# Altium footprint library Biblioteka.PcbLib: 55 footprints (part 2 of 4)
Each footprint in its own frame and in the unit in brackets; x right, y up, seen from the top. Pads: shape width x height; smd on the part's side, far side on the other; paste and mask are expansions set on the pad; w line width, h text height; cw(c..) or ccw(c..) is an arc to the next point about the centre after c.
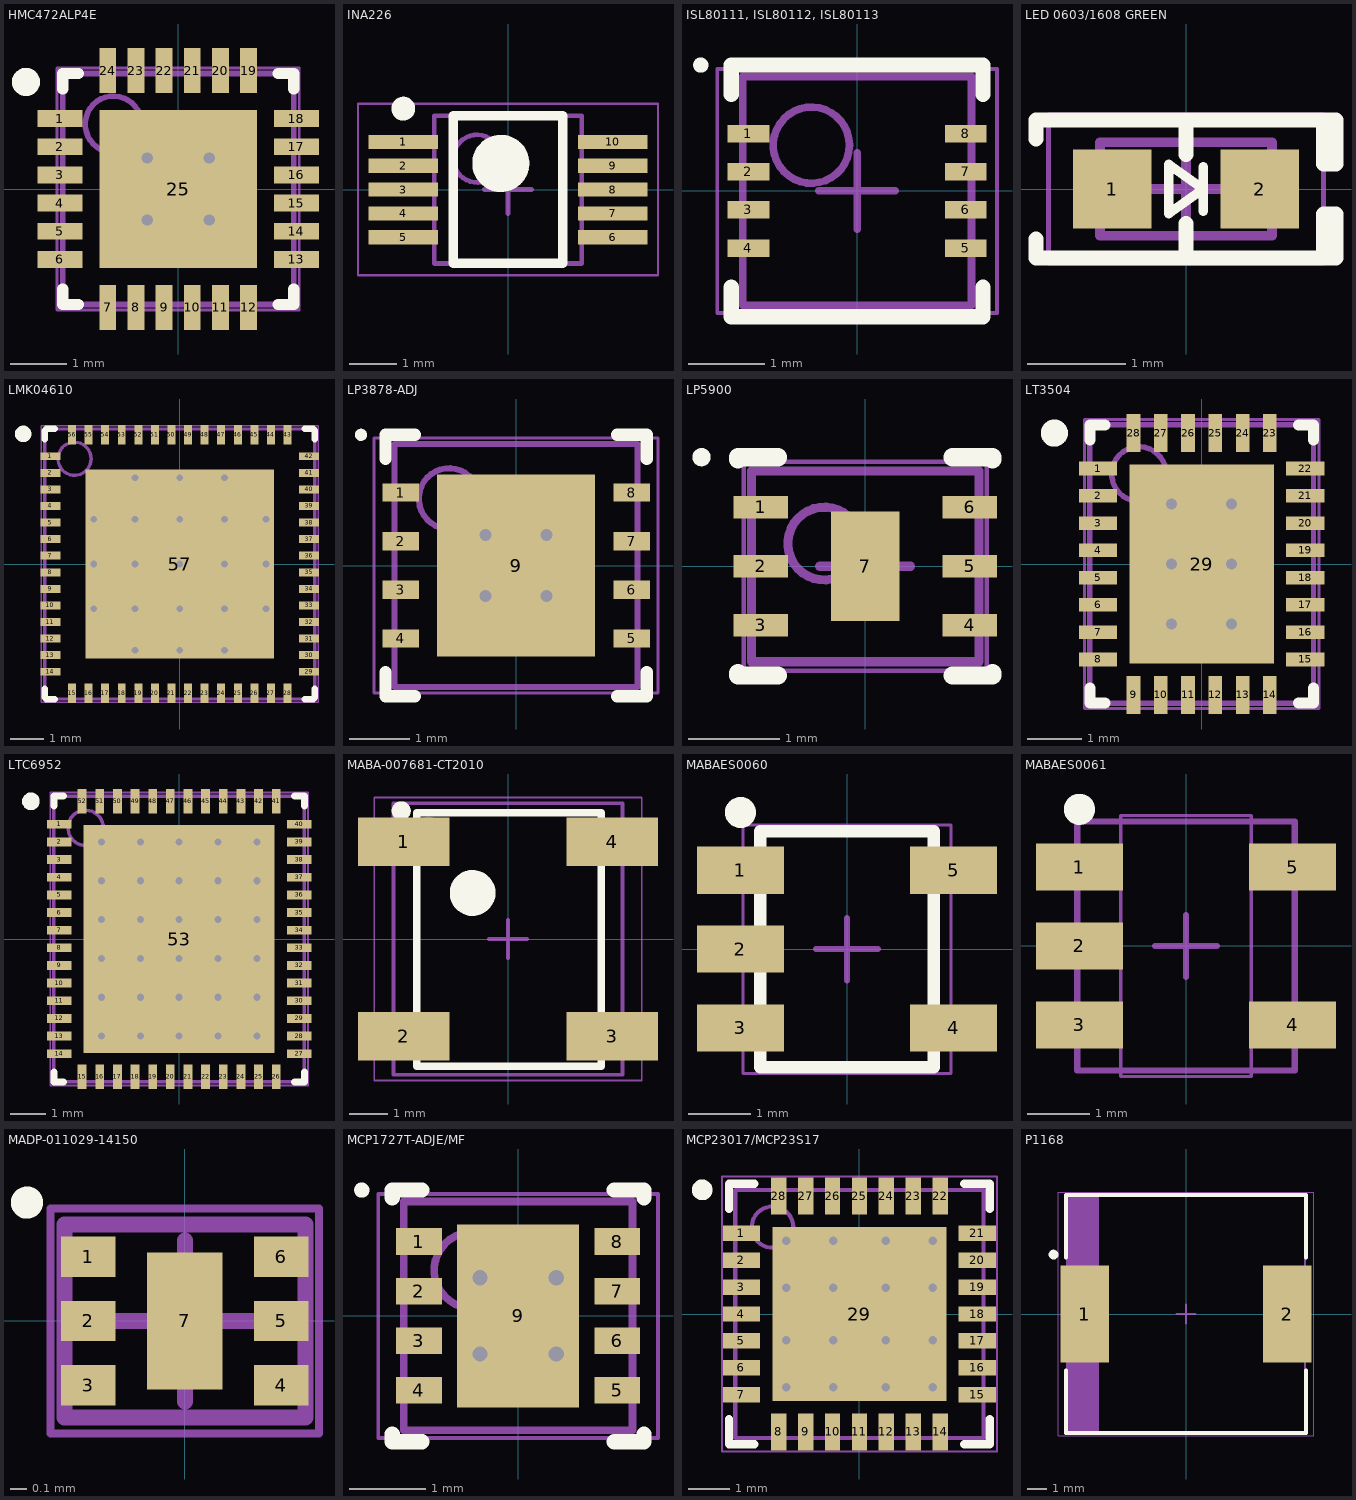
[diagram p1: the footprints below, top view; thin cyan lines are the x and y axes]

## HMC472ALP4E [mm] "24-VFQFN Exposed Pad"
height 0.39
pads (25):
  rect 0.8x0.3 smd mask+0.075: 1(-2.1,1.25) 2(-2.1,0.75) 3(-2.1,0.25) 4(-2.1,-0.25) 5(-2.1,-0.75) 6(-2.1,-1.25) 13(2.1,-1.25) 14(2.1,-0.75) 15(2.1,-0.25) 16(2.1,0.25) 17(2.1,0.75) 18(2.1,1.25)
  rect 0.3x0.8 smd mask+0.075: 7(-1.25,-2.1) 8(-0.75,-2.1) 9(-0.25,-2.1) 10(0.25,-2.1) 11(0.75,-2.1) 12(1.25,-2.1) 19(1.25,2.1) 20(0.75,2.1) 21(0.25,2.1) 22(-0.25,2.1) 23(-0.75,2.1) 24(-1.25,2.1)
  rect 2.8x2.8 smd paste-0.1 mask+0.075: 25(0,0)
via -0.55,0.55 diameter 0.5 hole 0.2
via 0.55,0.55 diameter 0.5 hole 0.2
via -0.55,-0.55 diameter 0.5 hole 0.2
via 0.55,-0.55 diameter 0.5 hole 0.2
Top Overlay:
  circle w0.25: c-2.7,1.9 r0.125
  lines w0.2: -2.05,-1.775 -2.05,-2.05 -1.775,-2.05 ; -2.05,1.775 -2.05,2.05 -1.775,2.05 ; 1.775,-2.05 2.05,-2.05 2.05,-1.775 ; 1.775,2.05 2.05,2.05 2.05,1.775
Mechanical 13:
  circle w0.1: c-1.15,1.15 r0.5
  lines w0.1: -2.05,-2.05 -2.05,2.05 2.05,2.05 2.05,-2.05 -2.05,-2.05
Mechanical 15:
  lines w0.05: -2.15,-2.15 -2.15,2.15 2.15,2.15 2.15,-2.15 -2.15,-2.15
  lines w0.1: -0.5,0 0.5,0 ; 0,-0.5 0,0.5
3D body "HMC472ALP4E.step": height 0.39, standoff 0, extent -2.05,-2.05 2.05,2.05

## INA226 [mm] "TSSOP, 10-Leads, Body 3,00x3,00mm, Pitch 0,50mm, IPC Medium Density"
height 1.1
pads (10):
  rect 1.45x0.3 smd: 1(-2.2,1) 2(-2.2,0.5) 3(-2.2,0) 4(-2.2,-0.5) 5(-2.2,-1) 6(2.2,-1) 7(2.2,-0.5) 8(2.2,0) 9(2.2,0.5) 10(2.2,1)
Top Overlay:
  circle w0.25: c-2.2,1.7 r0.125
  circle w0.6: c-0.15,0.55 r0.3
  lines w0.2: -1.15,-1.55 -1.15,1.55 1.15,1.55 1.15,-1.55 -1.15,-1.55
Mechanical 13:
  circle w0.1: c-0.65,0.65 r0.5
  lines w0.1: -1.55,-1.55 -1.55,1.55 1.55,1.55 1.55,-1.55 -1.55,-1.55
Mechanical 15:
  lines w0.05: -3.15,-1.8 -3.15,1.8 3.15,1.8 3.15,-1.8 -3.15,-1.8
  lines w0.1: -0.5,0 0.5,0 ; 0,-0.5 0,0.5
3D body "INA226.step": height 1.1, standoff 0, extent -2.45,-1.55 2.45,1.55

## ISL80111, ISL80112, ISL80113 [mm] "10 LEAD DUAL FLAT PACKAGE (DFN)"
height 1
pads (8):
  rect 0.55x0.23 smd: 1(-1.425,0.75) 2(-1.425,0.25) 3(-1.425,-0.25) 4(-1.425,-0.75) 5(1.425,-0.75) 6(1.425,-0.25) 7(1.425,0.25) 8(1.425,0.75)
Top Overlay:
  circle w0.1: c-2.05,1.65 r0.05
  lines w0.2: -1.65,-1.265 -1.65,-1.65 1.65,-1.65 1.65,-1.265 ; -1.65,1.265 -1.65,1.65 1.65,1.65 1.65,1.265
Mechanical 13:
  circle w0.1: c-0.6,0.6 r0.5
  lines w0.1: -1.5,-1.5 1.5,-1.5 1.5,1.5 -1.5,1.5 -1.5,-1.5
Mechanical 15:
  lines w0.05: -1.835,-1.6 1.835,-1.6 1.835,1.6 -1.835,1.6 -1.835,-1.6
  lines w0.1: -0.5,0 0.5,0 ; 0,-0.5 0,0.5
3D body "ISL80111, ISL80112, ISL80113.step": height 1, standoff 0, extent -1.58,-1.5 1.58,1.5

## LED 0603/1608 GREEN [mm] "Chip Diode, 2-Leads, Body 1.60x0.80mm, IPC Medium Density"
height 0.45
pads (2):
  rect 0.8x0.8 smd: 1(-0.75,0) 2(0.75,0)
Top Overlay:
  lines w0.1: 0.175,-0.225 0.175,0 ; 0.175,0.225 0.175,0 ; 0.175,0 -0.175,0.25 -0.175,0 -0.175,-0.25 0.175,0
  lines w0.15: -1.524,-0.508 -1.524,-0.7 1.5,-0.7 ; -1.524,0.508 -1.524,0.7 1.5,0.7 ; 0,-0.7 0,-0.35 ; 0,0.35 0,0.7 ; 1.397,-0.7 1.397,-0.254 1.524,-0.254 1.524,-0.7 1.397,-0.7 ; 1.397,0.254 1.397,0.7 1.524,0.7 1.524,0.254 1.397,0.254
Mechanical 13:
  lines w0.1: -0.875,-0.475 0.875,-0.475 0.875,0.475 -0.875,0.475 -0.875,-0.475
Mechanical 15:
  lines w0.05: -1.397,-0.75 1.397,-0.75 1.397,0.75 -1.397,0.75 -1.397,-0.75
  lines w0.1: -0.475,0 0.475,0 ; 0,-0.475 0,0.475
3D body "LED 0603 Base GREEN.STEP": height 0.28, standoff 0, extent -0.8,-0.4 0.8,0.4
3D body "LED 0603 Lens GREEN.STEP": height 0.53, standoff 0.18, extent -0.55,-0.4 0.55,0.4

## LMK04610 [mm] "PQFN, 56-Leads, Body 8,00x8,00mm, Pitch 0,50mm, Thermal Pad 5,70x5,70mm, IPC High Density"
height 1
pads (73):
  rect 0.6x0.24 smd: 1(-3.9,3.25) 2(-3.9,2.75) 3(-3.9,2.25) 4(-3.9,1.75) 5(-3.9,1.25) 6(-3.9,0.75) 7(-3.9,0.25) 8(-3.9,-0.25) 9(-3.9,-0.75) 10(-3.9,-1.25) 11(-3.9,-1.75) 12(-3.9,-2.25) 13(-3.9,-2.75) 14(-3.9,-3.25) 29(3.9,-3.25) 30(3.9,-2.75) 31(3.9,-2.25) 32(3.9,-1.75) 33(3.9,-1.25) 34(3.9,-0.75) 35(3.9,-0.25) 36(3.9,0.25) 37(3.9,0.75) 38(3.9,1.25) 39(3.9,1.75) 40(3.9,2.25) 41(3.9,2.75) 42(3.9,3.25)
  rect 0.24x0.6 smd: 15(-3.25,-3.9) 16(-2.75,-3.9) 17(-2.25,-3.9) 18(-1.75,-3.9) 19(-1.25,-3.9) 20(-0.75,-3.9) 21(-0.25,-3.9) 22(0.25,-3.9) 23(0.75,-3.9) 24(1.25,-3.9) 25(1.75,-3.9) 26(2.25,-3.9) 27(2.75,-3.9) 28(3.25,-3.9) 43(3.25,3.9) 44(2.75,3.9) 45(2.25,3.9) 46(1.75,3.9) 47(1.25,3.9) 48(0.75,3.9) 49(0.25,3.9) 50(-0.25,3.9) 51(-0.75,3.9) 52(-1.25,3.9) 53(-1.75,3.9) 54(-2.25,3.9) 55(-2.75,3.9) 56(-3.25,3.9)
  rect 5.7x5.7 smd paste-2.85 mask+0.102: 57(0,0)
  rect 1.15x1.15 on Top Paste: ""(-2.025,-2.025) ""(-2.025,-0.675) ""(-2.025,0.675) ""(-2.025,2.025) ""(-0.675,-2.025) ""(-0.675,-0.675) ""(-0.675,0.675) ""(-0.675,2.025) ""(0.675,-2.025) ""(0.675,-0.675) ""(0.675,0.675) ""(0.675,2.025) ""(2.025,-2.025) ""(2.025,-0.675) ""(2.025,0.675) ""(2.025,2.025)
via 1.35,-2.6 diameter 0.5 hole 0.2
via 0,-2.6 diameter 0.5 hole 0.2
via -1.35,-2.6 diameter 0.5 hole 0.2
via 2.6,-1.35 diameter 0.5 hole 0.2
via 1.35,-1.35 diameter 0.5 hole 0.2
via 0,-1.35 diameter 0.5 hole 0.2
via -1.35,-1.35 diameter 0.5 hole 0.2
via -2.6,-1.35 diameter 0.5 hole 0.2
via 2.6,0 diameter 0.5 hole 0.2
via 1.35,0 diameter 0.5 hole 0.2
via 0,0 diameter 0.5 hole 0.2
via -1.35,0 diameter 0.5 hole 0.2
via -2.6,0 diameter 0.5 hole 0.2
via 2.6,1.35 diameter 0.5 hole 0.2
via 1.35,1.35 diameter 0.5 hole 0.2
via 0,1.35 diameter 0.5 hole 0.2
via -1.35,1.35 diameter 0.5 hole 0.2
via -2.6,1.35 diameter 0.5 hole 0.2
via 1.35,2.6 diameter 0.5 hole 0.2
via 0,2.6 diameter 0.5 hole 0.2
via -1.35,2.6 diameter 0.5 hole 0.2
Top Overlay:
  circle w0.25: c-4.725,3.925 r0.125
  lines w0.2: -4.075,-3.77 -4.075,-4.025 -4.025,-4.075 -3.77,-4.075 ; -4.075,3.77 -4.075,4.025 -4.025,4.075 -3.77,4.075 ; 3.77,-4.075 4.025,-4.075 4.075,-4.025 4.075,-3.77 ; 3.77,4.075 4.025,4.075 4.075,4.025 4.075,3.77
Mechanical 13:
  circle w0.1: c-3.175,3.175 r0.5
  lines w0.1: -4.075,-4.025 -4.075,4.025 -4.025,4.075 4.025,4.075 4.075,4.025 4.075,-4.025 4.025,-4.075 -4.025,-4.075 -4.075,-4.025
Mechanical 15:
  lines w0.05: -4.175,-4.175 4.175,-4.175 4.175,4.175 -4.175,4.175 -4.175,-4.175
  lines w0.1: -0.5,0 0.5,0 ; 0,-0.5 0,0.5
3D body "LMK04610.step": height 1, standoff 0, extent -4.075,-4.075 4.075,4.075

## LP3878-ADJ [mm] "SDC08A"
height 0.8
pads (9):
  rect 0.6x0.3 smd: 1(-1.9,1.2) 2(-1.9,0.4) 3(-1.9,-0.4) 4(-1.9,-1.2) 5(1.9,-1.2) 6(1.9,-0.4) 7(1.9,0.4) 8(1.9,1.2)
  rect 2.6x3 smd: 9(0,0)
via 0.5,-0.5 diameter 0.5 hole 0.2
via -0.5,-0.5 diameter 0.5 hole 0.2
via 0.5,0.5 diameter 0.5 hole 0.2
via -0.5,0.5 diameter 0.5 hole 0.2
Top Overlay:
  circle w0.1: c-2.55,2.15 r0.05
  lines w0.2: -2.15,-1.75 -2.15,-2.15 -1.66,-2.15 ; -2.15,1.75 -2.15,2.15 -1.66,2.15 ; 1.66,-2.15 2.15,-2.15 2.15,-1.75 ; 1.66,2.15 2.15,2.15 2.15,1.75
Mechanical 13:
  circle w0.1: c-1.1,1.1 r0.5
  lines w0.1: -2,-2 2,-2 2,2 -2,2 -2,-2
Mechanical 15:
  lines w0.05: -2.335,-2.1 2.335,-2.1 2.335,2.1 -2.335,2.1 -2.335,-2.1
  lines w0.1: -0.5,0 0.5,0 ; 0,-0.5 0,0.5
3D body "LP3878-ADJ.step": height 0.8, standoff 0, extent -2,-2 2,2

## LP5900 [mm] "PSON, 6-Leads, Body 2.10x2.50mm, Pitch 0.65mm, Thermal Pad 1.20x0.75mm, IPC High Density"
height 0.8
pads (7):
  rect 0.6x0.25 smd: 1(-1.15,0.65) 2(-1.15,0) 3(-1.15,-0.65) 4(1.15,-0.65) 5(1.15,0) 6(1.15,0.65)
  rect 0.75x1.2 smd: 7(0,0)
Top Overlay:
  circle w0.1: c-1.8,1.2 r0.05
  lines w0.2: -1.4,-1.175 -1.4,-1.2 -0.96,-1.2 ; -1.4,1.175 -1.4,1.2 -0.96,1.2 ; 0.96,-1.2 1.4,-1.2 1.4,-1.175 ; 0.96,1.2 1.4,1.2 1.4,1.175
Mechanical 13:
  circle w0.1: c-0.45,0.25 r0.4
  lines w0.1: -1.25,-1.05 -1.25,1.05 1.25,1.05 1.25,-1.05 -1.25,-1.05
Mechanical 15:
  lines w0.05: -1.335,-1.15 -1.335,1.15 1.335,1.15 1.335,-1.15 -1.335,-1.15
  lines w0.1: -0.5,0 0.5,0 ; 0,-0.5 0,0.5
3D body "LP5900.step": height 0.8, standoff 0, extent -1.251,-1.05 1.251,1.05

## LT3504 [mm] "UFD Package  28-Lead Plastic QFN (4mm × 5mm)  (Reference LTC DWG # 05-08-1712 Rev B)"
height 0.8
pads (29):
  rect 0.7x0.25 smd: 1(-1.9,1.75) 2(-1.9,1.25) 3(-1.9,0.75) 4(-1.9,0.25) 5(-1.9,-0.25) 6(-1.9,-0.75) 7(-1.9,-1.25) 8(-1.9,-1.75) 15(1.9,-1.75) 16(1.9,-1.25) 17(1.9,-0.75) 18(1.9,-0.25) 19(1.9,0.25) 20(1.9,0.75) 21(1.9,1.25) 22(1.9,1.75)
  rect 0.25x0.7 smd: 9(-1.25,-2.4) 10(-0.75,-2.4) 11(-0.25,-2.4) 12(0.25,-2.4) 13(0.75,-2.4) 14(1.25,-2.4) 23(1.25,2.4) 24(0.75,2.4) 25(0.25,2.4) 26(-0.25,2.4) 27(-0.75,2.4) 28(-1.25,2.4)
  rect 2.65x3.65 smd: 29(0,0)
via -0.55,1.1 diameter 0.5 hole 0.2
via 0.55,1.1 diameter 0.5 hole 0.2
via -0.55,0 diameter 0.5 hole 0.2
via 0.55,0 diameter 0.5 hole 0.2
via -0.55,-1.1 diameter 0.5 hole 0.2
via 0.55,-1.1 diameter 0.5 hole 0.2
Top Overlay:
  circle w0.25: c-2.7,2.4 r0.125
  lines w0.2: -2.05,-2.275 -2.05,-2.55 -1.775,-2.55 ; -2.05,2.275 -2.05,2.55 -1.775,2.55 ; 1.775,-2.55 2.05,-2.55 2.05,-2.275 ; 1.775,2.55 2.05,2.55 2.05,2.275
Mechanical 13:
  circle w0.1: c-1.15,1.65 r0.5
  lines w0.1: -2.05,-2.55 -2.05,2.55 2.05,2.55 2.05,-2.55 -2.05,-2.55
Mechanical 15:
  lines w0.05: -2.15,-2.65 -2.15,2.65 2.15,2.65 2.15,-2.65 -2.15,-2.65
  lines w0.1: -0.5,0 0.5,0 ; 0,-0.5 0,0.5
3D body "LT3504.step": height 0.8, standoff 0, extent -2.05,-2.55 2.05,2.55

## LTC6952 [mm] "PQFN, 52-Leads, Body 7,00x8,00mm, Pitch 0,50mm, Thermal Pad 5,70x6,70mm, IPC High Density"
height 0.8
pads (53):
  rect 0.7x0.25 smd: 1(-3.4,3.25) 2(-3.4,2.75) 3(-3.4,2.25) 4(-3.4,1.75) 5(-3.4,1.25) 6(-3.4,0.75) 7(-3.4,0.25) 8(-3.4,-0.25) 9(-3.4,-0.75) 10(-3.4,-1.25) 11(-3.4,-1.75) 12(-3.4,-2.25) 13(-3.4,-2.75) 14(-3.4,-3.25) 27(3.4,-3.25) 28(3.4,-2.75) 29(3.4,-2.25) 30(3.4,-1.75) 31(3.4,-1.25) 32(3.4,-0.75) 33(3.4,-0.25) 34(3.4,0.25) 35(3.4,0.75) 36(3.4,1.25) 37(3.4,1.75) 38(3.4,2.25) 39(3.4,2.75) 40(3.4,3.25)
  rect 0.25x0.7 smd: 15(-2.75,-3.9) 16(-2.25,-3.9) 17(-1.75,-3.9) 18(-1.25,-3.9) 19(-0.75,-3.9) 20(-0.25,-3.9) 21(0.25,-3.9) 22(0.75,-3.9) 23(1.25,-3.9) 24(1.75,-3.9) 25(2.25,-3.9) 26(2.75,-3.9) 41(2.75,3.9) 42(2.25,3.9) 43(1.75,3.9) 44(1.25,3.9) 45(0.75,3.9) 46(0.25,3.9) 47(-0.25,3.9) 48(-0.75,3.9) 49(-1.25,3.9) 50(-1.75,3.9) 51(-2.25,3.9) 52(-2.75,3.9)
  rect 5.41x6.45 smd: 53(0,0)
via -2.2,2.75 diameter 0.5 hole 0.2
via -1.1,2.75 diameter 0.5 hole 0.2
via 0,2.75 diameter 0.5 hole 0.2
via 1.1,2.75 diameter 0.5 hole 0.2
via 2.2,2.75 diameter 0.5 hole 0.2
via -2.2,1.65 diameter 0.5 hole 0.2
via -1.1,1.65 diameter 0.5 hole 0.2
via 0,1.65 diameter 0.5 hole 0.2
via 1.1,1.65 diameter 0.5 hole 0.2
via 2.2,1.65 diameter 0.5 hole 0.2
via -2.2,0.55 diameter 0.5 hole 0.2
via -1.1,0.55 diameter 0.5 hole 0.2
via 0,0.55 diameter 0.5 hole 0.2
via 1.1,0.55 diameter 0.5 hole 0.2
via 2.2,0.55 diameter 0.5 hole 0.2
via -2.2,-0.55 diameter 0.5 hole 0.2
via -1.1,-0.55 diameter 0.5 hole 0.2
via 0,-0.55 diameter 0.5 hole 0.2
via 1.1,-0.55 diameter 0.5 hole 0.2
via 2.2,-0.55 diameter 0.5 hole 0.2
via -2.2,-1.65 diameter 0.5 hole 0.2
via -1.1,-1.65 diameter 0.5 hole 0.2
via 0,-1.65 diameter 0.5 hole 0.2
via 1.1,-1.65 diameter 0.5 hole 0.2
via 2.2,-1.65 diameter 0.5 hole 0.2
via -2.2,-2.75 diameter 0.5 hole 0.2
via -1.1,-2.75 diameter 0.5 hole 0.2
via 0,-2.75 diameter 0.5 hole 0.2
via 1.1,-2.75 diameter 0.5 hole 0.2
via 2.2,-2.75 diameter 0.5 hole 0.2
Top Overlay:
  circle w0.25: c-4.2,3.9 r0.125
  lines w0.2: -3.55,-3.775 -3.55,-4.05 -3.275,-4.05 ; -3.55,3.775 -3.55,4.05 -3.275,4.05 ; 3.275,-4.05 3.55,-4.05 3.55,-3.775 ; 3.275,4.05 3.55,4.05 3.55,3.775
Mechanical 13:
  circle w0.1: c-2.65,3.15 r0.5
  lines w0.1: -3.55,-4.05 -3.55,4.05 3.55,4.05 3.55,-4.05 -3.55,-4.05
Mechanical 15:
  lines w0.05: -3.65,-4.15 -3.65,4.15 3.65,4.15 3.65,-4.15 -3.65,-4.15
  lines w0.1: -0.5,0 0.5,0 ; 0,-0.5 0,0.5
3D body "PQFN50P700X800X80_HS-53L.step": height 0.8, standoff 0, extent -3.55,-4.05 3.55,4.05

## MABA-007681-CT2010 [mm] "MABA-007681-CT2010"
height 1.75
pads (4):
  rect 2.4x1.27 smd: 1(-2.725,2.54) 2(-2.725,-2.54) 3(2.725,-2.54) 4(2.725,2.54)
Top Overlay:
  circle w0.6: c-0.925,1.205 r0.3
  circle w0.25: c-2.794,3.353 r0.125
  lines w0.2: -2.388,-3.327 2.438,-3.327 2.438,3.302 -2.388,3.302 -2.388,-3.327
Mechanical 13:
  circle w0.1: c-2.1,2.65 r0.5
  lines w0.1: -3,-3.55 3,-3.55 3,3.55 -3,3.55 -3,-3.55
Mechanical 15:
  lines w0.05: -3.5,-3.7 3.5,-3.7 3.5,3.7 -3.5,3.7 -3.5,-3.7
  lines w0.1: -0.5,0 0.5,0 ; 0,-0.5 0,0.5
3D body "MABA-007681-CT2010 .step": height 1.85, standoff 0.1, extent -3.175,-3.55 3.175,3.55

## MABAES0060 [mm] "SOTFL, 5-Leads, Body 3.81x2.81mm, Pitch 1.27mm, IPC High Density"
height 2.8
pads (5):
  rect 1.4x0.76 smd: 1(-1.715,1.27) 2(-1.715,0) 3(-1.715,-1.27) 4(1.715,-1.27) 5(1.715,1.27)
Top Overlay:
  circle w0.25: c-1.715,2.2 r0.125
  lines w0.2: -1.397,-1.9 1.4,-1.9 1.4,1.9 -1.397,1.9 -1.397,-1.9
Mechanical 13:
  lines w0.1: -1.4,-1.905 -1.4,1.905 1.4,1.905 1.4,-1.905 -1.4,-1.905
Mechanical 15:
  lines w0.05: -1.675,-2 -1.675,2 1.675,2 1.675,-2 -1.675,-2
  lines w0.1: -0.5,0 0.5,0 ; 0,-0.5 0,0.5
3D body "MABAES0060.step": height 2.8, standoff 0, extent -1.405,-1.903 1.405,1.903

## MABAES0061 [mm] "6-SMD (5 Leads), Flat Lead"
height 2.9
pads (5):
  rect 1.4x0.76 smd: 1(-1.715,1.27) 2(-1.715,0) 3(-1.715,-1.27) 4(1.715,-1.27) 5(1.715,1.27)
Top Overlay:
  circle w0.25: c-1.715,2.2 r0.125
Mechanical 13:
  lines w0.1: -1.75,-2.005 -1.75,2.005 1.75,2.005 1.75,-2.005 -1.75,-2.005
Mechanical 15:
  lines w0.05: -1.05,-2.1 -1.05,2.1 1.05,2.1 1.05,-2.1 -1.05,-2.1
  lines w0.1: -0.5,0 0.5,0 ; 0,-0.5 0,0.5
3D body "MABAES0061.step": height 2.9, standoff 0, extent -1.748,-2.003 1.748,2.003

## MADP-011029-14150 [mm] "PSON, 6-Leads, Body 1,20x1,50mm, Pitch 0,40mm, Thermal Pad 0,85x0,47mm, IPC High Density"
height 0.8
pads (7):
  rect 0.34x0.25 smd: 1(-0.6,0.4) 2(-0.6,0) 3(-0.6,-0.4) 4(0.6,-0.4) 5(0.6,0) 6(0.6,0.4)
  rect 0.47x0.85 smd: 7(0,0)
Top Overlay:
  circle w0.1: c-0.982,0.737 r0.05
Mechanical 13:
  lines w0.1: -0.75,-0.6 -0.75,0.6 0.75,0.6 0.75,-0.6 -0.75,-0.6
Mechanical 15:
  lines w0.05: -0.835,-0.7 -0.835,0.7 0.835,0.7 0.835,-0.7 -0.835,-0.7
  lines w0.1: -0.5,0 0.5,0 ; 0,-0.5 0,0.5
3D body "MADP-011029-14150.step": height 0.8, standoff 0, extent -0.751,-0.6 0.751,0.6

## MCP1727T-ADJE/MF [mm] "SON, 8-Leads, Body 3.00x3.00mm, Pitch 0.65mm, Thermal Pad 2.40x1.60mm, IPC High Density"
height 1
pads (9):
  rect 0.6x0.35 smd: 1(-1.3,0.975) 2(-1.3,0.325) 3(-1.3,-0.325) 4(-1.3,-0.975) 5(1.3,-0.975) 6(1.3,-0.325) 7(1.3,0.325) 8(1.3,0.975)
  rect 1.6x2.4 smd: 9(0,0)
via -0.5,0.5 diameter 0.5 hole 0.2
via 0.5,0.5 diameter 0.5 hole 0.2
via -0.5,-0.5 diameter 0.5 hole 0.2
via 0.5,-0.5 diameter 0.5 hole 0.2
Top Overlay:
  circle w0.1: c-2.05,1.65 r0.05
  lines w0.2: -1.65,-1.55 -1.65,-1.65 -1.26,-1.65 ; -1.65,1.55 -1.65,1.65 -1.26,1.65 ; 1.26,-1.65 1.65,-1.65 1.65,-1.55 ; 1.26,1.65 1.65,1.65 1.65,1.55
Mechanical 13:
  circle w0.1: c-0.6,0.6 r0.5
  lines w0.1: -1.5,-1.5 -1.5,1.5 1.5,1.5 1.5,-1.5 -1.5,-1.5
Mechanical 15:
  lines w0.05: -1.835,-1.6 -1.835,1.6 1.835,1.6 1.835,-1.6 -1.835,-1.6
  lines w0.1: -0.5,0 0.5,0 ; 0,-0.5 0,0.5
3D body: height 1, standoff 0.05, extent -1.5,-1.5 1.5,1.5

## MCP23017/MCP23S17 [mm] "QFN, 28-Leads, Body 6,00x6,00mm, Pitch 0,65mm, Thermal Pad 4,25x4,25mm, IPC High Density"
height 1
pads (29):
  rect 0.9x0.37 smd: 1(-2.85,1.95) 2(-2.85,1.3) 3(-2.85,0.65) 4(-2.85,0) 5(-2.85,-0.65) 6(-2.85,-1.3) 7(-2.85,-1.95) 15(2.85,-1.95) 16(2.85,-1.3) 17(2.85,-0.65) 18(2.85,0) 19(2.85,0.65) 20(2.85,1.3) 21(2.85,1.95)
  rect 0.37x0.9 smd: 8(-1.95,-2.85) 9(-1.3,-2.85) 10(-0.65,-2.85) 11(0,-2.85) 12(0.65,-2.85) 13(1.3,-2.85) 14(1.95,-2.85) 22(1.95,2.85) 23(1.3,2.85) 24(0.65,2.85) 25(0,2.85) 26(-0.65,2.85) 27(-1.3,2.85) 28(-1.95,2.85)
  rect 4.2x4.2 smd paste-2.125: 29(0,0)
via -1.77,1.77 diameter 0.5 hole 0.2
via -0.635,1.77 diameter 0.5 hole 0.2
via 0.635,1.77 diameter 0.5 hole 0.2
via 1.77,1.77 diameter 0.5 hole 0.2
via -1.77,0.635 diameter 0.5 hole 0.2
via 1.77,0.635 diameter 0.5 hole 0.2
via -1.77,-0.635 diameter 0.5 hole 0.2
via -0.635,-0.635 diameter 0.5 hole 0.2
via 0.635,-0.635 diameter 0.5 hole 0.2
via 1.77,-0.635 diameter 0.5 hole 0.2
via -1.77,-1.77 diameter 0.5 hole 0.2
via -0.635,-1.77 diameter 0.5 hole 0.2
via 1.77,-1.77 diameter 0.5 hole 0.2
via -0.635,0.635 diameter 0.5 hole 0.2
via 0.635,0.635 diameter 0.5 hole 0.2
via 0.635,-1.77 diameter 0.5 hole 0.2
Top Overlay:
  circle w0.25: c-3.8,3 r0.125
  lines w0.2: -3.15,-2.535 -3.15,-3.15 -2.535,-3.15 ; -3.15,2.535 -3.15,3.15 -2.535,3.15 ; 2.535,-3.15 3.15,-3.15 3.15,-2.535 ; 2.535,3.15 3.15,3.15 3.15,2.535
Top Paste:
  rectangle: -1.85,0.75 -0.75,1.85
  rectangle: -1.85,-0.55 -0.75,0.55
  rectangle: -1.85,-1.85 -0.75,-0.75
  rectangle: -0.55,0.75 0.55,1.85
  rectangle: -0.55,-0.55 0.55,0.55
  rectangle: -0.55,-1.85 0.55,-0.75
  rectangle: 0.75,0.75 1.85,1.85
  rectangle: 0.75,-0.55 1.85,0.55
  rectangle: 0.75,-1.85 1.85,-0.75
Mechanical 13:
  circle w0.1: c-2.1,2.1 r0.5
  lines w0.1: -3,-3 -3,3 3,3 3,-3 -3,-3
Mechanical 15:
  lines w0.05: -3.325,-3.325 -3.325,3.325 3.325,3.325 3.325,-3.325 -3.325,-3.325
  lines w0.1: -0.5,0 0.5,0 ; 0,-0.5 0,0.5
3D body: height 1, standoff 0.08, extent -3,-3 3,3

## P1168 [mm] "Precision Wire Wound Inductor, 2-Leads, Body 12,24x12,24mm, IPC High Density"
height 4.5
pads (2):
  rect 2.5x5 smd: 1(-5.2,0) 2(5.2,0)
Top Overlay:
  circle w0.25: c-6.8,3.05 r0.125
  lines w0.2: -6.15,-2.9 -6.15,-6.1 6.15,-6.1 6.15,-2.9 ; -6.15,2.9 -6.15,6.1 6.15,6.1 6.15,2.9
Mechanical 13:
  rectangle: -6.12,-6.12 -4.474,6.12
  lines w0.1: -6.12,-6.12 6.12,-6.12 6.12,6.12 -6.12,6.12 -6.12,-6.12
Mechanical 15:
  lines w0.05: -6.55,-6.25 6.55,-6.25 6.55,6.25 -6.55,6.25 -6.55,-6.25
  lines w0.1: -0.5,0 0.5,0 ; 0,-0.5 0,0.5
3D body "P1168.step": height 4.6, standoff 0, extent -6.22,-6.12 6.22,6.12